# Altium footprint library DR127-331-R.PcbLib: 1 footprints
Each footprint in its own frame and in the unit in brackets; x right, y up, seen from the top. Pads: shape width x height; smd on the part's side, far side on the other; paste and mask are expansions set on the pad; w line width, h text height; cw(c..) or ccw(c..) is an arc to the next point about the centre after c.
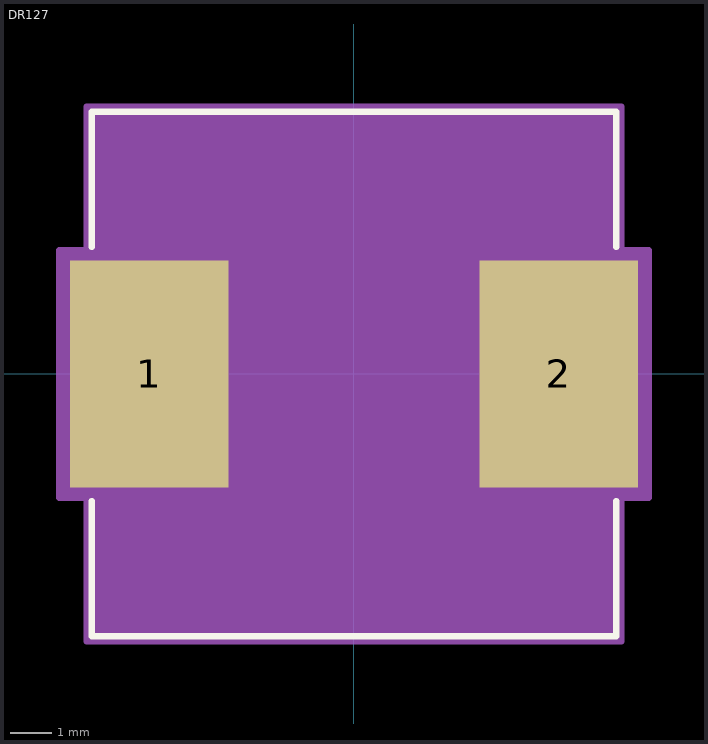
[diagram p0: the footprint, top view; thin cyan lines are the x and y axes]

## DR127 [mil]
pads (2):
  rect 152x217 smd paste+0 mask+0: 1(-196,0) 2(196,0)
Top Overlay:
  lines w6: -251,-121.6 -251,-251 251,-251 251,-121.6 ; -251,121.6 -251,251 251,251 251,121.6
  text ".Designator" at -137.5,-25 h50
Mechanical 13:
  lines w1: -246,-246 -246,246 246,246 246,-246 -246,-246
  text ".Designator" at -137.5,-25 h50
Mechanical 15:
  region: 246,-246 -246,-246 -246,246 246,246
  region: -256,-118.5 -282,-118.5 -282,118.5 -256,118.5 -256,256 256,256 256,118.5 282,118.5 282,-118.5 256,-118.5 256,-256 -256,-256
  lines w6: -282,-118.5 -256,-118.5 -256,-256 256,-256 256,-118.5 282,-118.5 282,118.5 256,118.5 256,256 -256,256 -256,118.5 -282,118.5 -282,-118.5
3D body "DR127.step": height 315, standoff 0, extent -245.98,-245.98 245.98,245.98